# Altium schematic symbol library roundtrip.SchLib: 2 symbols
Pins are listed as number, name and electrical type; pins without a type are passive.

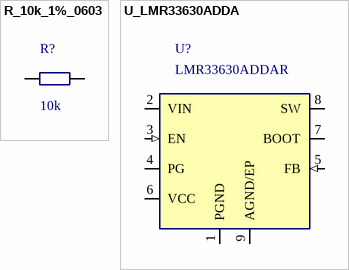
[diagram p0: symbols R_10k_1%_0603 to U_LMR33630ADDA]

## R_10k_1%_0603
designator R?, comment 10k
10 kOhm 1% 100mW 0603 (RENB, MOSFET gate); Manufacturer: UNI-ROYAL; MPN: 0603WAF1002T5E; Value: 10k; LCSC: C25804; JLCPCB Type: Basic; Datasheet: 0603WAF1002T5E_C25804.pdf
footprint RESC1608_0603
pins: 1, 2

## U_LMR33630ADDA
designator U?, comment LMR33630ADDAR
Sync buck 3.8-36 V in, 3 A, 400 kHz (A), HSOIC-8 PowerPAD; EP = AGND; Manufacturer: Texas Instruments; Value: LMR33630ADDAR; MPN: LMR33630ADDAR; LCSC: C841384; JLCPCB Type: Extended; Datasheet: lmr33630.pdf
footprint LMR33630_HSOIC8_DDA
pins: 1 PGND (power), 2 VIN (power), 3 EN (in), 4 PG (oc), 5 FB (in), 6 VCC, 7 BOOT, 8 SW, 9 AGND/EP (power)